# Altium footprint library FootPrintLib_1.PcbLib: 498 footprints (part 29 of 35)
Each footprint in its own frame and in the unit in brackets; x right, y up, seen from the top. Pads: shape width x height; smd on the part's side, far side on the other; paste and mask are expansions set on the pad; w line width, h text height; cw(c..) or ccw(c..) is an arc to the next point about the centre after c.
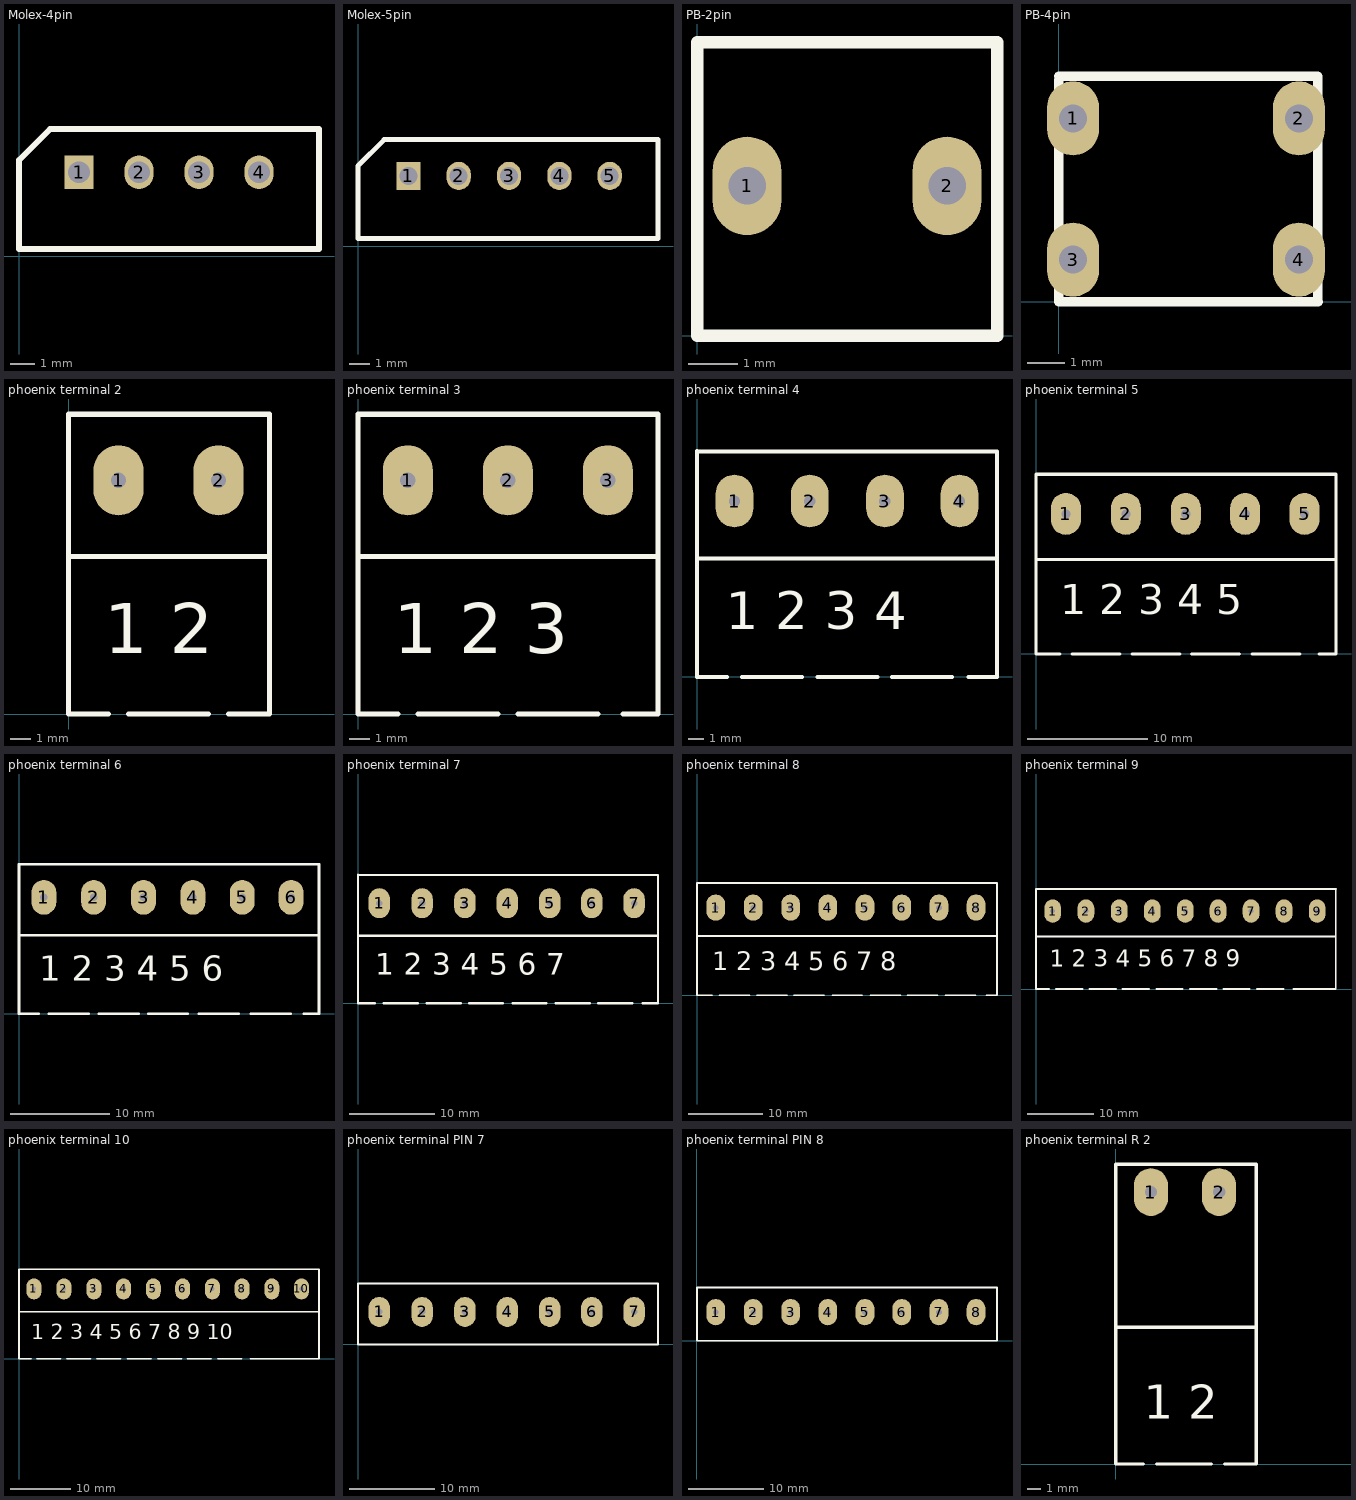
[diagram p28: the footprints below, top view; thin cyan lines are the x and y axes]

## Molex-4pin [mm] "Molex-4pin"
pads (4):
  rect 1.2x1.4 hole 0.9: 1(2.5,3.5)
  oval 1.2x1.4 hole 0.9: 2(5,3.5) 3(7.5,3.5) 4(10,3.5)
Top Overlay:
  lines w0.254: 0,0.3 0,4 1.3,5.3 12.5,5.3 12.5,0.3 0,0.3
3D body "022035045.stp": height 5.95, standoff -3.45, extent 0.074,0.375 12.474,5.275

## Molex-5pin [mm] "Molex-5pin"
pads (5):
  rect 1.2x1.4 hole 0.9: 1(2.5,3.5)
  oval 1.2x1.4 hole 0.9: 2(5,3.5) 3(7.5,3.5) 4(10,3.5) 5(12.5,3.5)
Top Overlay:
  lines w0.254: 0,0.4 14.9,0.4 14.9,4 14.9,5.3 13.5,5.3 1.3,5.3 0,4 0,0.4
3D body "022035055.stp": height 6.45, standoff -2.95, extent 0.05,0.43 14.95,5.33

## PB-2pin [mil] "Switch"
height 236.22
pads (2):
  oval 55.12x78.74 hole 30: 1(40,120) 2(200,120)
Top Overlay:
  lines w10: 0,0 240,0 240,235 0,235 0,0

## PB-4pin [mil] "Switch"
height 236.22
pads (4):
  oval 55.12x78.74 hole 30: 1(15,195) 2(255,195) 3(15,45) 4(255,45)
Top Overlay:
  lines w10: 0,236.22 0,0 275.59,0 ; 0,240 275,240 275,0

## phoenix terminal 2 [mil] "2 terminals"
pads (2):
  oval 98.43x137.8 hole 30: 1(98.15,460) 2(295,460)
Top Overlay:
  lines w10: 0,590 393.7,590 ; 0,590.55 0,0 78.74,0 ; 5,310 395,310 ; 118.11,0 275.59,0 ; 314.96,0 395,0 395,590
  text "1 2" at 70,120 h98.43

## phoenix terminal 3 [mil] "3 terminals"
pads (3):
  oval 98.43x137.8 hole 30: 1(98.15,460) 2(295,460) 3(491.85,460)
Top Overlay:
  lines w10: 0,590 590.55,590 590.55,0 521.65,0 ; 0,590.55 0,0 78.74,0 ; 5,310 590.55,310 ; 118.11,0 275.59,0 ; 314.96,0 472.44,0
  text "1 2 3" at 70,120 h98.43

## phoenix terminal 4 [mil] "4 terminals"
pads (4):
  oval 98.43x137.8 hole 30: 1(98.15,460) 2(295,460) 3(491.85,460) 4(686.85,460)
Top Overlay:
  lines w10: 0,590 785,590 785,0 710,0 ; 0,590.55 0,0 78.74,0 ; 5,310 785,310 ; 118.11,0 275.59,0 ; 314.96,0 472.44,0 ; 509.96,0 667.44,0
  text "1 2 3 4" at 75,125 h98.43

## phoenix terminal 5 [mil] "5 terminals"
pads (5):
  oval 98.43x137.8 hole 30: 1(98.15,460) 2(295,460) 3(491.85,460) 4(686.85,460) 5(881.85,460)
Top Overlay:
  lines w10: 0,590 984.25,590 ; 0,590.55 0,0 78.74,0 ; 5,310 985,310 ; 118.11,0 275.59,0 ; 314.96,0 472.44,0 ; 509.96,0 667.44,0 ; 709.96,0 867.44,0 ; 930,0 985,0 985,590
  text "1 2 3 4 5" at 80,130 h98.43

## phoenix terminal 6 [mil] "6 terminals"
pads (6):
  oval 98.43x137.8 hole 30: 1(98.15,460) 2(295,460) 3(491.85,460) 4(686.85,460) 5(881.85,460) 6(1075,460)
Top Overlay:
  lines w10: 0,590 1181.1,590 ; 0,590.55 0,0 78.74,0 ; 5,310 1185,310 ; 118.11,0 275.59,0 ; 314.96,0 472.44,0 ; 509.96,0 667.44,0 ; 709.96,0 867.44,0 ; 914.96,0 1072.44,0 ; 1125,0 1185,0 1185,590
  text "1 2 3 4 5 6" at 80,130 h98.43

## phoenix terminal 7 [mil] "7 terminals"
pads (7):
  oval 98.43x137.8 hole 30: 1(98.15,460) 2(295,460) 3(491.85,460) 4(686.85,460) 5(881.85,460) 6(1075,460) 7(1270,460)
Top Overlay:
  lines w10: 0,590 1377.95,590 ; 0,590.55 0,0 78.74,0 ; 5,310 1380,310 ; 118.11,0 275.59,0 ; 314.96,0 472.44,0 ; 509.96,0 667.44,0 ; 709.96,0 867.44,0 ; 909.96,0 1067.44,0 ; 1104.96,0 1262.44,0 ; 1310,0 1380,0 1380,590
  text "1 2 3 4 5 6 7" at 80,130 h98.43

## phoenix terminal 8 [mil] "8 terminals"
pads (8):
  oval 98.43x137.8 hole 30: 1(98.15,460) 2(295,460) 3(491.85,460) 4(686.85,460) 5(881.85,460) 6(1075,460) 7(1270,460) 8(1465,460)
Top Overlay:
  lines w10: 0,590 1574.8,590 ; 0,590.55 0,0 78.74,0 ; 5,310 1575,310 ; 118.11,0 275.59,0 ; 314.96,0 472.44,0 ; 509.96,0 667.44,0 ; 709.96,0 867.44,0 ; 909.96,0 1067.44,0 ; 1104.96,0 1262.44,0 ; 1304.96,0 1462.44,0 ; 1520,0 1575,0 1575,590
  text "1 2 3 4 5 6 7 8" at 80,130 h98.43

## phoenix terminal 9 [mil] "9 terminals"
pads (9):
  oval 98.43x137.8 hole 30: 1(98.15,460) 2(295,460) 3(491.85,460) 4(686.85,460) 5(881.85,460) 6(1075,460) 7(1270,460) 8(1465,460) 9(1660,460)
Top Overlay:
  lines w10: 0,590 1771.65,590 ; 0,590.55 0,0 78.74,0 ; 5,310 1770,310 ; 118.11,0 275.59,0 ; 314.96,0 472.44,0 ; 509.96,0 667.44,0 ; 709.96,0 867.44,0 ; 909.96,0 1067.44,0 ; 1104.96,0 1262.44,0 ; 1304.96,0 1462.44,0 ; 1520,0 1770,0 1770,590
  text "1 2 3 4 5 6 7 8 9" at 80,130 h98.43

## phoenix terminal 10 [mil] "10 terminals"
pads (10):
  oval 98.43x137.8 hole 30: 1(98.15,460) 2(295,460) 3(491.85,460) 4(686.85,460) 5(881.85,460) 6(1075,460) 7(1270,460) 8(1465,460) 9(1660,460) 10(1855,460)
Top Overlay:
  lines w10: 0,590 1968.5,590 ; 0,590.55 0,0 78.74,0 ; 5,310 1965,310 ; 118.11,0 275.59,0 ; 314.96,0 472.44,0 ; 509.96,0 667.44,0 ; 709.96,0 867.44,0 ; 909.96,0 1067.44,0 ; 1104.96,0 1262.44,0 ; 1304.96,0 1462.44,0 ; 1520,0 1970,0 1970,590
  text "1 2 3 4 5 6 7 8 9 10" at 80,130 h98.43

## phoenix terminal PIN 7 [mm] "7 terminals"
pads (7):
  oval 2.5x3.5 hole 0.762: 1(2.493,3.81) 2(7.493,3.81) 3(12.493,3.81) 4(17.446,3.81) 5(22.399,3.81) 6(27.305,3.81) 7(32.258,3.81)
Top Overlay:
  lines w0.254: 0,7.112 35,7.112 ; 0,7.126 0,0 35.052,0 35.052,7.112

## phoenix terminal PIN 8 [mm] "8 terminals"
pads (8):
  oval 2.5x3.5 hole 0.762: 1(2.54,3.81) 2(7.54,3.81) 3(12.54,3.81) 4(17.493,3.81) 5(22.446,3.81) 6(27.352,3.81) 7(32.305,3.81) 8(37.258,3.81)
Top Overlay:
  lines w0.254: 0.047,7.112 40.047,7.112 ; 0.047,7.126 0.047,0 40.052,0 40.052,7.112

## phoenix terminal R 2 [mm] "2 Right terminals"
pads (2):
  oval 2.5x3.5 hole 0.9: 1(2.573,19.939) 2(7.573,19.939)
Top Overlay:
  lines w0.254: 0,21.971 10.287,21.971 10.287,0 8,0 ; 0,22 0,0 2,0 ; 0.127,10.033 10.287,10.033 ; 3,0 7,0
  text "1 2" at 2.032,3.302 h2.5